# Altium footprint library AI_NODE.PcbLib: 22 footprints (part 2 of 2)
Each footprint in its own frame and in the unit in brackets; x right, y up, seen from the top. Pads: shape width x height; smd on the part's side, far side on the other; paste and mask are expansions set on the pad; w line width, h text height; cw(c..) or ccw(c..) is an arc to the next point about the centre after c.
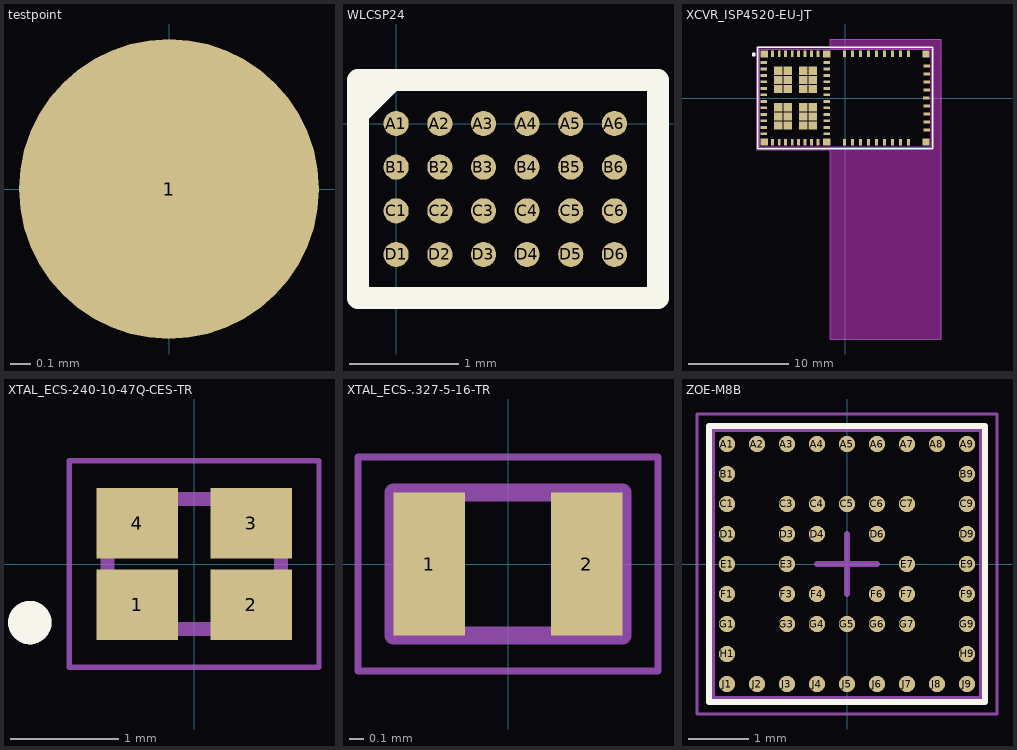
[diagram p1: the footprints below, top view; thin cyan lines are the x and y axes]

## testpoint [mm]
pads (1):
  round 1.5 smd: 1(0,0)

## WLCSP24 [mm]
pads (24):
  round 0.23 smd mask-0.02: A1(0,0) A2(0.4,0) A3(0.8,0) A4(1.2,0) A5(1.6,0) A6(2,0) B1(0,-0.4) B2(0.4,-0.4) B3(0.8,-0.4) B4(1.2,-0.4) B5(1.6,-0.4) B6(2,-0.4) C1(0,-0.8) C2(0.4,-0.8) C3(0.8,-0.8) C4(1.2,-0.8) C5(1.6,-0.8) C6(2,-0.8) D1(0,-1.2) D2(0.4,-1.2) D3(0.8,-1.2) D4(1.2,-1.2) D5(1.6,-1.2) D6(2,-1.2)
Top Overlay:
  lines w0.2: -0.34,0.11 -0.324,0.11 -0.037,0.397 ; 2.4,-1.6 -0.35,-1.6 -0.35,0.4 2.4,0.4 2.4,-1.57
3D body: height 0.51, standoff 0.21, extent -0.28,-1.52 2.36,0.32
3D body: height 0.52, standoff 0.5, extent -0.151,-0.103 0.103,0.151

## XCVR_ISP4520-EU-JT [mm]
pads (97):
  rect 0.7x0.7 smd: 1(-8.1,4.4) 14(-8.1,-4.4) 23(-1.85,-4.4) 36(-1.85,4.4) 54(8.1,-4.4) 64(8.1,4.4)
  rect 0.65x0.3 smd: 2(-8.125,3.575) 3(-8.125,2.925) 4(-8.125,2.275) 5(-8.125,1.625) 6(-8.125,0.975) 7(-8.125,0.325) 8(-8.125,-0.325) 9(-8.125,-0.975) 10(-8.125,-1.625) 11(-8.125,-2.275) 12(-8.125,-2.925) 13(-8.125,-3.575) 24(-1.825,-3.575) 25(-1.825,-2.925) 26(-1.825,-2.275) 27(-1.825,-1.625) 28(-1.825,-0.975) 29(-1.825,-0.325) 30(-1.825,0.325) 31(-1.825,0.975) 32(-1.825,1.625) 33(-1.825,2.275) 34(-1.825,2.925) 35(-1.825,3.575) 55(8.13,-3.2) 56(8.13,-2.4) 57(8.13,-1.6) 58(8.13,-0.8) 59(8.125,0) 60(8.13,0.8) 61(8.13,1.6) 62(8.13,2.4) 63(8.13,3.2)
  rect 0.3x0.65 smd: 15(-7.25,-4.425) 16(-6.6,-4.425) 17(-5.95,-4.425) 18(-5.3,-4.425) 19(-4.65,-4.425) 20(-4,-4.425) 21(-3.35,-4.425) 22(-2.7,-4.425) 37(-2.7,4.425) 38(-3.35,4.425) 39(-4,4.425) 40(-4.65,4.425) 41(-5.3,4.425) 42(-5.95,4.425) 43(-6.6,4.425) 44(-7.25,4.425) 45(-0.075,-4.425) 46(0.725,-4.425) 47(1.525,-4.425) 48(2.325,-4.425) 49(3.125,-4.425) 50(3.925,-4.425) 51(4.725,-4.425) 52(5.525,-4.425) 53(6.325,-4.425) 65(6.325,4.425) 66(5.525,4.425) 67(4.725,4.425) 68(3.925,4.425) 69(3.125,4.425) 70(2.325,4.425) 71(1.525,4.425) 72(0.725,4.425) 73(-0.075,4.425)
  rect 0.85x0.8 smd: 74(-6.72,2.725) 75(-5.77,2.725) 76(-4.175,2.725) 77(-3.225,2.725) 78(-6.72,1.825) 79(-5.77,1.825) 80(-4.175,1.825) 81(-3.225,1.825) 82(-6.72,0.925) 83(-5.77,0.925) 84(-4.175,0.925) 85(-3.225,0.925) 86(-6.72,-0.925) 87(-5.77,-0.925) 88(-4.175,-0.925) 89(-3.225,-0.925) 90(-6.72,-1.825) 91(-5.77,-1.825) 92(-4.175,-1.825) 93(-3.225,-1.825) 94(-6.72,-2.725) 95(-5.77,-2.725) 96(-4.175,-2.725) 97(-3.225,-2.725)
Top Overlay:
  circle w0.2: c-9.15,4.35 r0.1
  lines w0.127: -8.77,-5.07 8.77,-5.07 8.77,5.07 -8.77,5.07 -8.77,-5.07
Keep-Out Layer:
  region: 9.6,-24.1 -1.5,-24.1 -1.5,-4.9 8.6,-4.9 8.6,4.9 -1.5,4.9 -1.5,5.9 9.6,5.9
  region: 9.6,-24.1 -1.5,-24.1 -1.5,-4.9 8.6,-4.9 8.6,4.9 -1.5,4.9 -1.5,5.9 9.6,5.9
  region: 9.6,-24.1 -1.5,-24.1 -1.5,-4.9 8.6,-4.9 8.6,4.9 -1.5,4.9 -1.5,5.9 9.6,5.9
Mechanical 13:
  circle w0.2: c-9.15,4.35 r0.1
  lines w0.05: -8.85,-5.15 -8.85,5.15 -1.5,5.15 -1.5,5.9 9.6,5.9 9.6,-24.1 -1.5,-24.1 -1.5,-5.15 -8.85,-5.15
  lines w0.127: -8.6,-4.9 8.6,-4.9 8.6,4.9 -8.6,4.9 -8.6,-4.9
Mechanical 15:
  lines w0.05: -8.85,-5.15 -8.85,5.15 -1.5,5.15 -1.5,5.9 9.6,5.9 9.6,-24.1 -1.5,-24.1 -1.5,-5.15 -8.85,-5.15
3D body "ISP4520EUJT--3DModel-STEP-1.STEP": height 1.71, standoff 0.01, extent -8.6,-4.9 8.6,4.9

## XTAL_ECS-240-10-47Q-CES-TR [mm]
pads (4):
  rect 0.75x0.65 smd: 1(-0.525,-0.375) 2(0.525,-0.375) 3(0.525,0.375) 4(-0.525,0.375)
Top Overlay:
  circle w0.2: c-1.515,-0.54 r0.1
Mechanical 13:
  circle w0.2: c-1.515,-0.54 r0.1
  lines w0.127: -0.8,-0.6 -0.8,0.6 0.8,0.6 0.8,-0.6 -0.8,-0.6
Mechanical 15:
  lines w0.05: -1.15,-0.95 -1.15,0.95 1.15,0.95 1.15,-0.95 -1.15,-0.95
3D body "ECS-240-10-47Q-CES-TR--3DModel-STEP-269445.STEP": height 0.41, standoff 0.01, extent -0.8,-0.6 0.8,0.6

## XTAL_ECS-.327-5-16-TR [mm]
pads (2):
  rect 0.5x1 smd: 1(-0.55,0) 2(0.55,0)
Mechanical 13:
  lines w0.127: -0.8,-0.5 0.8,-0.5 0.8,0.5 -0.8,0.5 -0.8,-0.5
Mechanical 15:
  lines w0.05: -1.05,-0.75 1.05,-0.75 1.05,0.75 -1.05,0.75 -1.05,-0.75
3D body "ECS-.327-9-16-TR.STEP": height 0.51, standoff 0.01, extent -0.8,-0.5 0.8,0.5

## ZOE-M8B [mm] "LGA, 51-Leads, Body 4.50x4.50mmx1.20mm, Pitch 0.50mm"
height 1
pads (51):
  round 0.27 smd: A1(-2,2) A2(-1.5,2) A3(-1,2) A4(-0.5,2) A5(0,2) A6(0.5,2) A7(1,2) A8(1.5,2) A9(2,2) B1(-2,1.5) B9(2,1.5) C1(-2,1) C3(-1,1) C4(-0.5,1) C5(0,1) C6(0.5,1) C7(1,1) C9(2,1) D1(-2,0.5) D3(-1,0.5) D4(-0.5,0.5) D6(0.5,0.5) D9(2,0.5) E1(-2,0) E3(-1,0) E7(1,0) E9(2,0) F1(-2,-0.5) F3(-1,-0.5) F4(-0.5,-0.5) F6(0.5,-0.5) F7(1,-0.5) F9(2,-0.5) G1(-2,-1) G3(-1,-1) G4(-0.5,-1) G5(0,-1) G6(0.5,-1) G7(1,-1) G9(2,-1) H1(-2,-1.5) H9(2,-1.5) J1(-2,-2) J2(-1.5,-2) J3(-1,-2) J4(-0.5,-2) J5(0,-2) J6(0.5,-2) J7(1,-2) J8(1.5,-2) J9(2,-2)
Top Overlay:
  lines w0.1: -2.3,-2.3 -2.3,2.3 2.3,2.3 2.3,-2.3 -2.3,-2.3
Mechanical 12:
  lines w0.1: -2.25,-2.25 2.25,-2.25 2.25,2.25 -2.25,2.25 -2.25,-2.25
Mechanical 15:
  lines w0.05: -2.5,-2.5 2.5,-2.5 2.5,2.5 -2.5,2.5 -2.5,-2.5
  lines w0.1: -0.5,0 0.5,0 ; 0,-0.5 0,0.5
3D body "LGA81C50P9X9_450X450X120.step": height 1.2, standoff 0, extent -2.25,-2.25 2.25,2.25